# Altium schematic symbol library MMSZ5246B-TP.SchLib: 1 symbol
Pins are listed as number, name and electrical type; pins without a type are passive.

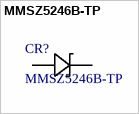
[diagram p0: symbol MMSZ5246B-TP]

## MMSZ5246B-TP
designator CR?
DIODE ZENER 16V 500MW SOD123; Manufacturer_Name: MCC; Copyright: Copyright (C) 2026 Ultra Librarian. All rights reserved.; Manufacturer_Part_Number: MMSZ5246B-TP
footprint ZDO_SOD123_MCC
pins: 1, 2